# Altium footprint library WC_.PcbLib: 20 footprints (part 2 of 2)
Each footprint in its own frame and in the unit in brackets; x right, y up, seen from the top. Pads: shape width x height; smd on the part's side, far side on the other; paste and mask are expansions set on the pad; w line width, h text height; cw(c..) or ccw(c..) is an arc to the next point about the centre after c.
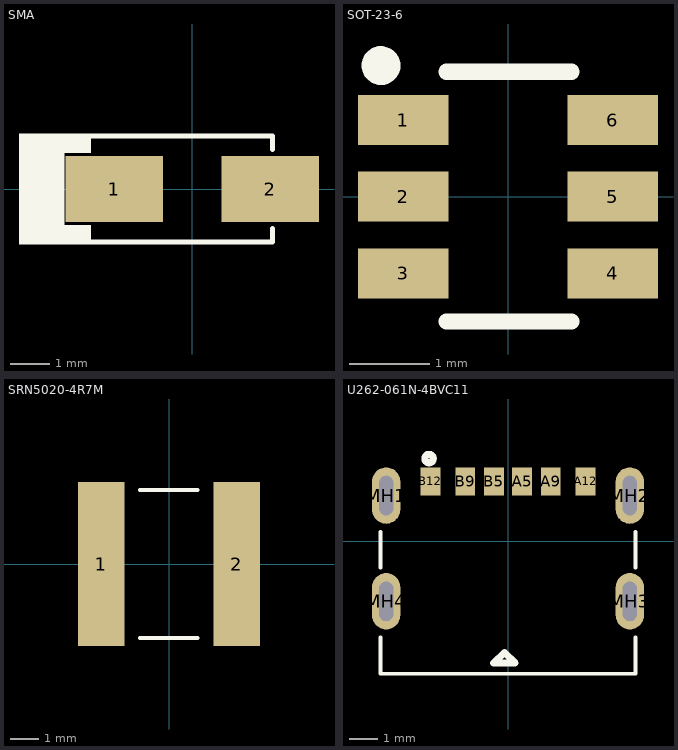
[diagram p1: the footprints below, top view; thin cyan lines are the x and y axes]

## SMA [mm]
pads (2):
  rect 2.5x1.7 smd: 1(-2,0) 2(2,0)
Top Overlay:
  rectangle: -3.3,-1.422 -2.596,-0.924
  rectangle: -4.445,-1.422 -3.278,1.422
  rectangle: -3.3,0.924 -2.596,1.422
  lines w0.127: -2.658,-1.358 2.061,-1.358 2.061,-1.012 ; -2.658,1.358 2.061,1.358 2.061,1.012
3D body "User Library-DO-214AC SMA.step": height 2.4, standoff 0, extent -2.6,-1.3 2.6,1.3

## SOT-23-6 [mm]
pads (6):
  rect 1.12x0.62 smd: 1(-1.3,0.95) 2(-1.3,0) 3(-1.3,-0.95) 4(1.3,-0.95) 5(1.3,0) 6(1.3,0.95)
Top Overlay:
  circle w0.254: c-1.575,1.626 r0.114
  lines w0.2: -0.762,-1.549 0.787,-1.549 ; -0.762,1.549 0.787,1.549
3D body "User Library-SOT23-6-2.step": height 1.42, standoff -0.03, extent -1.4,-1.45 1.4,1.45

## SRN5020-4R7M [mm]
pads (2):
  rect 1.6x5.7 smd: 1(-2.35,0) 2(2.35,0)
Top Overlay:
  lines w0.127: -1.016,-2.565 0.991,-2.565 ; -1.016,2.565 0.991,2.565
3D body "srn5020-4r7m.stp": height 2, standoff 0, extent -2.5,-2.5 2.5,2.5

## U262-061N-4BVC11 [mm]
pads (10):
  rect 0.7x1 smd: A5(0.5,2.125) A9(1.52,2.125) A12(2.75,2.125) B5(-0.5,2.125) B9(-1.52,2.125) B12(-2.75,2.125)
  oval 1x2 hole 0.5 slot 1.4 at 90 deg: MH1(-4.32,1.625) MH2(4.32,1.625) MH3(4.32,-2.125) MH4(-4.32,-2.125)
Top Overlay:
  circle w0.254: c-2.801,2.938 r0.148
  lines w0.127: -4.523,-3.407 -4.523,-4.69 4.523,-4.69 4.523,-3.407 ; -4.523,-0.94 -4.523,0.343 ; 4.523,-0.94 4.523,0.343
  lines w0.254: -0.508,-4.318 0.254,-4.318 -0.127,-3.937 -0.508,-4.318
3D body "new1.STEP": height 3.3, standoff -1.1, extent -4.475,-4.695 4.475,2.405